# Altium schematic symbol library ECS-80-12-33-JGN-TR.SchLib: 1 symbol
Pins are listed as number, name and electrical type; pins without a type are passive.

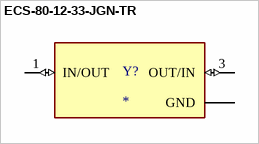
[diagram p0: symbol ECS-80-12-33-JGN-TR]

## ECS-80-12-33-JGN-TR
designator Y?
The sub miniature ECX-32 is a compact SMD Crystal. The 3.2 x 2.5 x 0.8 mm ceramic package is ideal for todayâ€™s SMD manufacturing environment.; MF: {'manufacturer': u'ECS Inc.'}; MP: ECS-80-12-33-JGN-TR; Package: None; Price: None; Value: *; Availability: Unavailable
footprint XTAL_ECS-240-8-33-AGN-TR
pins: 1 IN/OUT (io), 2 GND (power), 3 OUT/IN (io), 4 GND (power)